# Altium schematic symbol library Brian_.SchLib: 123 symbols (part 1 of 4)
Pins are listed as number, name and electrical type; pins without a type are passive.

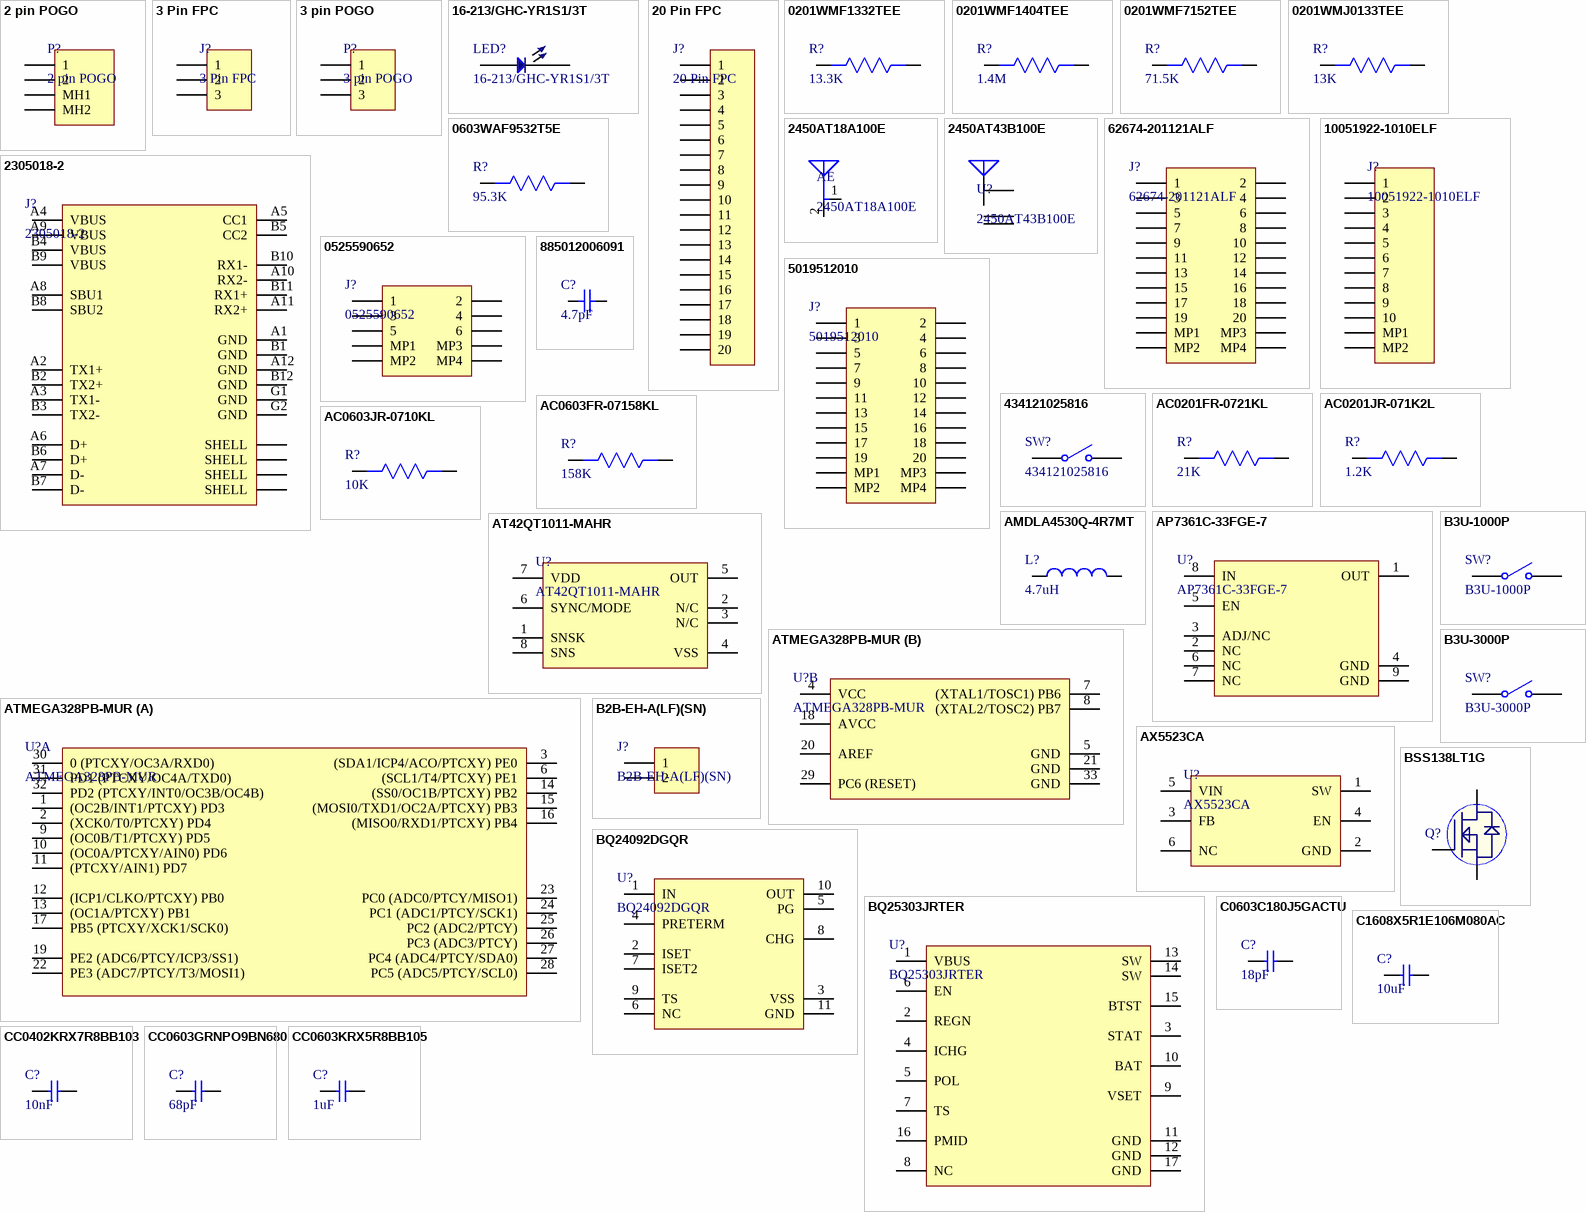
[diagram p0: symbols 2 pin POGO to CC0603KRX5R8BB105]

## 2 pin POGO
designator P?
2 Positions Pitch Magnets 2.3MM; Manufacturer: Hongkong RTL Industrial Ltd Store; Manufacturer Part No: *; Package: Custom; Link: https://pl.aliexpress.com/item/1005001616656419.html?spm=a2g0o.detail.1000023.11.291b5aa1UC9QtG
footprint 2 pin POGO
pins: 1, 2, MH1, MH2

## 3 Pin FPC
designator J?
CONN FPC 3POS 0.5MM SMD R/A; ComponentLink1URL: https://www.molex.com/pdm_docs/pk/5051479200-200.pdf?src-supplier=Digi-Key; ComponentLink1Description: https://www.molex.com/pdm_docs/pk/5051479200-200.pdf?src-supplier=Digi-Key; ComponentLink2URL: http://www.molex.com/pdm_docs/sd/5051470390_sd.pdf?src-supplier=Digi-Key; ComponentLink2Description: http://www.molex.com/pdm_docs/sd/5051470390_sd.pdf?src-supplier=Digi-Key; ComponentLink3URL: https://www.molex.com/pdm_docs/sd/5051470390_sd.pdf?src-supplier=Digi-Key; ComponentLink3Description: https://www.molex.com/pdm_docs/sd/5051470390_sd.pdf?src-supplier=Digi-Key
footprint 3 Pin FPC
pins: 1, 2, 3

## 3 pin POGO
designator P?
3 Positions Pitch Magnets 2.3MM; Manufacturer: Hongkong RTL Industrial Ltd Store; Manufacturer Part No: *; Package: Custom; Link: https://pl.aliexpress.com/item/33012000850.html
pins: 1, 2, 3

## 16-213/GHC-YR1S1/3T
designator LED?
Green 520~535nm 0402 Light Emitting Diodes (LED) RoHS; Manufacturer: Everlight Elec; Luminous Intensity (IF=20mA): 112~285mcd; Package: 0402; Illumination Color: Green; Dominant Wavelength / Coordinate rank: 520~535nm; Mounting Type: Surface Mount
footprint LED 0402 (Green 520~535nm 0402 Light Emitting Diodes (LED) RoHS)
pins: 1, 2

## 20 Pin FPC
designator J?
CONN FPC 20POS 0.5MM SMD R/A
footprint 20 Pin FPC
pins: 1, 2, 3, 4, 5, 6, 7, 8, 9, 10, 11, 12, 13, 14, 15, 16, 17, 18, 19, 20

## 0201WMF1332TEE
designator R?, comment 13.3K
RES SMD 13.3K  1/20W 0201; Manufacturer: UNI-ROYAL(Uniroyal Elec); Manufacturer Part No: 0201WMF1332TEE; Temperature Coefficient: ±200ppm/℃; Package: 0201; Power: 1/20W
footprint Res-0201
pins: 1, 2

## 0201WMF1404TEE
designator R?, comment 1.4M
1.4MΩ ±1% 1/20W ±200ppm/℃ 0201 Chip Resistor - Surface Mount RoHS; Manufacturer: UNI-ROYAL(Uniroyal Elec); Manufacturer Part No: 0201WMF1404TEE; Package: 0201; Resistance: 1.4MΩ; Tolerance: ±1%; Power(Watts): 1/20W; Temperature Coefficient: ±200ppm/℃
footprint Res-0201
pins: 1, 2

## 0201WMF7152TEE
designator R?, comment 71.5K
71.5kΩ ±1% 0.05W ±200ppm/℃ 0201 Chip Resistor - Surface Mount RoHS; Manufacturer: UNI-ROYAL(Uniroyal Elec); Package: 0201; Resistance: 71.5kΩ; Tolerance: ±1%; Power(Watts): Power(Watts); Temperature Coefficient1: ±200ppm/℃
footprint Res-0201
pins: 1, 2

## 0201WMJ0133TEE
designator R?, comment 13K
13kΩ ±5% 1/20W ±200ppm/℃ 0201 Chip Resistor - Surface Mount RoHS; Manufacturer: UNI-ROYAL(Uniroyal Elec); Package: 0201; Resistance: 13kΩ; Tolerance: ±5%; Power(Watts): 1/20W; Temperature Coefficient: ±200ppm/℃; Operating Temperature Range: -
footprint Res-0201
pins: 1, 2

## 0603WAF9532T5E
designator R?, comment 95.3K
95.3kΩ ±1% 0.1W ±100ppm/℃ 0603 Chip Resistor - Surface Mount RoHS; Manufacturer: UNI-ROYAL(Uniroyal Elec); Manufacturer Part No: 0603WAF9532T5E; Package: 0603; Value: 95.3K
footprint Res0603
pins: 1, 2

## 2450AT18A100E
designator AE
2.4GHz Chip RF Antenna 2.4GHz ~ 2.5GHz 0.5dBi Solder Surface Mount; MF: Johanson Technology; Price: None; SnapEDA_Link: https://www.snapeda.com/parts/2450AT18A100E/Johanson%20Technology%20Inc./view-part/267154/?ref=snap; Package: FBGA-780 Johanson; Availability: Unavailable; Value: *; MP: 2450AT18A100E
footprint 2450AT18A100E (RF ANT 2.4GHZ CHIP SOLDER SMD)
pins: 1 FEED, 2 NC

## 2450AT43B100E
designator U?
RF ANT 2.4GHZ CHIP SOLDER SMD; Manufacturer: Johanson; Impedance: 50R; Power Rating: 2W; Number of Bands: 1; Return Loss: -9.5dB; Max Frequency: 2.5GHz; Gain: -0.5dB; ComponentLink1URL: https://media.digikey.com/pdf/Data%20Sheets/Proant%20PDF's/PRO-OB-440_Dwg.PDF?src-supplier=Digi-Key; ComponentLink1Description: https://media.digikey.com/pdf/Data%20Sheets/Proant%20PDF's/PRO-OB-440_Dwg.PDF?src-supplier=Digi-Key; ComponentLink2URL: http://www.proant.se/files/user/Application%20note%20-%20OnBoard%20SMD%20GNSS%20rev%202.0.pdf?src-supplier=Digi-Key; ComponentLink2Description: http://www.proant.se/files/user/Application%20note%20-%20OnBoard%20SMD%20GNSS%20rev%202.0.pdf?src-supplier=Digi-Key; ComponentLink3URL: http://www.proant.se/files/user/Documents/Datasheet%20-%20OnBoard%20SMD%202400%20MHz%20rev%203.pdf?src-supplier=Digi-Key; ComponentLink3Description: http://www.proant.se/files/user/Documents/Datasheet%20-%20OnBoard%20SMD%202400%20MHz%20rev%203.pdf?src-supplier=Digi-Key; Supplier 1: Digi-Key; Manufacturer Part Number: 2450AT43B100E; Stock 1: 0; Pricing 1: 1=0.71, 10=0.624, 25=0.586, 100=0.4782, 250=0.4442, 500=0.378 (USD); Mount: Surface Mount; Case/Package: SMD/SMT; Number of Pins: 4; Contact Plating: Tin; Package Quantity: 1; Packaging: Tape and Reel; Max Power Dissipation: 2W; Termination: Solder; Frequency: 2.4GHz; Series: -; Min Frequency: 2.4GHz; Input Impedance: 50R; Input Power: 2W; Length: 7mm; Width: 2mm; Height: 0.079inch; Radiation Hardening: No; REACH SVHC: Unknown; ComponentLink4URL: http://www.farnell.com/datasheets/1860765.pdf?src-supplier=Element14; ComponentLink4Description: http://www.farnell.com/datasheets/1860765.pdf?src-supplier=Element14; ComponentLink5URL: http://www.mouser.com/ds/2/611/2450AT43B100-242468.pdf?src-supplier=Mouser; ComponentLink5Description: http://www.mouser.com/ds/2/611/2450AT43B100-242468.pdf?src-supplier=Mouser; ComponentLink6URL: https://www.johansontechnology.com/datasheets/2450AT43B100/2450AT43B100.pdf?src-supplier=Digi-Key; ComponentLink6Description: https://www.johansontechnology.com/datasheets/2450AT43B100/2450AT43B100.pdf?src-supplier=Digi-Key; Supplier Part Number 1: 712-1010-1-ND
footprint 2450AT43B100E (RF ANT 2.4GHZ CHIP SOLDER SMD)
pins: 1 A, 2 A, 3 A hidden, 4 A hidden

## 62674-201121ALF
designator J?
CONN FFC VERT 20POS 0.50MM SMD; Manufacturer: AMPHENOL ICC (FCI); Supplier 1: Digi-Key; Manufacturer Part Number: 62674-201121ALF; RoHS: No; Stock 1: 6990; Pricing 1: 1=0.77000, 10=0.67800, 25=0.63840, 50=0.61160, 100=0.58510, 250=0.53188, 500=0.47868 (USD); ComponentLink1URL: http://www.farnell.com/datasheets/2357988.pdf?src-supplier=Farnell; ComponentLink1Description: http://www.farnell.com/datasheets/2357988.pdf?src-supplier=Farnell; ComponentLink2URL: http://www.farnell.com/datasheets/2357988.pdf?src-supplier=Newark; ComponentLink2Description: http://www.farnell.com/datasheets/2357988.pdf?src-supplier=Newark; Supplier Part Number 1: 609-1207-1-ND
footprint 62674-201121ALF
pins: 1, 2, 3, 4, 5, 6, 7, 8, 9, 10, 11, 12, 13, 14, 15, 16, 17, 18, 19, 20, MP1, MP2, MP3, MP4

## 2305018-2
designator J?
CONN RCP USB3.1 TYPEC 24P SMD RA; Manufacturer: TE Connectivity AMP; Connector Type: USB; Number of Contacts: 24; Gender: Receptacle; Number of Ports: 1; Current Rating: 1.25A; Voltage Rating: 30V; Shielding: Shielded; Ratings: Waterproof; Supplier 1: Digi-Key; Manufacturer Part Number: 2305018-2; RoHS: Yes; Category: USB Connectors; Stock 1: 4590; Pricing 1: 1=3.00000, 10=2.87800, 25=2.63840, 50=2.51840, 100=2.39840, 250=2.09864 (USD); Mount: Surface Mount,Through Hole; Contact Plating: Gold; Insulation Color: Black; Min Operating Temperature: -40°C; Max Operating Temperature: 85°C; Packaging: Tape and Reel; Termination: Solder; Flammability Rating: UL94 V-0; RoHS Compliant: Yes; ComponentLink1URL: http://www.farnell.com/datasheets/2611889.pdf?src-supplier=Farnell; ComponentLink1Description: http://www.farnell.com/datasheets/2611889.pdf?src-supplier=Farnell; ComponentLink2URL: https://www.te.com/commerce/DocumentDelivery/DDEController?Action=srchrtrv&DocNm=2305018&DocType=Customer+Drawing&DocLang=English&src-supplier=Digi-Key; ComponentLink2Description: https://www.te.com/commerce/DocumentDelivery/DDEController?Action=srchrtrv&DocNm=2305018&DocType=Customer+Drawing&DocLang=English&src-supplier=Digi-Key; ComponentLink3URL: http://www.farnell.com/datasheets/2611889.pdf?src-supplier=Newark; ComponentLink3Description: http://www.farnell.com/datasheets/2611889.pdf?src-supplier=Newark; Supplier Part Number 1: A132569CT-ND
footprint 2305018-2
pins: A1 GND (power), A2 TX1+, A3 TX1-, A4 VBUS (power), A5 CC1, A6 D+, A7 D-, A8 SBU1, A9 VBUS (power), A10 RX2-, A11 RX2+, A12 GND (power), B1 GND (power), B2 TX2+, B3 TX2-, B4 VBUS (power), B5 CC2, B6 D+, B7 D-, B8 SBU2, B9 VBUS (power), B10 RX1-, B11 RX1+, B12 GND (power), G1 GND (power), G2 GND (power), S1 SHELL, S2 SHELL, S3 SHELL, S4 SHELL

## 10051922-1010ELF
designator J?
CONN FPC BOTTOM 10POS 0.50MM R/A; Manufacturer: Amphenol ICC / FCI; Actuator Material: Nylon,Glass,Polyamide; Number of Contacts: 10; Contact Resistance: 30mR; Current Rating: 500mA; Voltage Rating: 50V; Insulation Resistance: 100MR; Gender: Female; Pitch: 0.5mm; Supplier 1: Digi-Key; Manufacturer Part Number: 10051922-1010ELF; RoHS: Yes; Category: FFC / FPC; Stock 1: 3582; Pricing 1: 1=0.88000, 10=0.77600, 25=0.73040, 50=0.70000, 100=0.66950, 250=0.60864, 500=0.54776, 1000=0.48690 (USD); Mount: Surface Mount; Contact Material: Copper Alloy,Bronze; Contact Plating: Gold; Housing Color: Natural; Housing Material: Polymer; Min Operating Temperature: -55°C; Max Operating Temperature: 85°C; Number of Rows: 1; Termination: Solder; Orientation: Right Angle; Packaging: Tape and Reel; Package Quantity: 4500; Number of Positions: 10; Contact Location: Bottom; Max Voltage Rating (AC): 50V; Max Voltage Rating (DC): 50V; Series: VLL; Length: 7.5mm; Width: 3.4mm; Depth: 3.4mm; Radiation Hardening: No; REACH SVHC: No SVHC; Lead Free: Lead Free; Flammability Rating: UL94 V-0; ComponentLink1URL: https://datasheet.ciiva.com/10367/10051922-10367679.pdf?src-supplier=Avnet; ComponentLink1Description: https://datasheet.ciiva.com/10367/10051922-10367679.pdf?src-supplier=Avnet; ComponentLink2URL: https://datasheet.ciiva.com/15176/getdatasheetpartid-131484-15176375.pdf?src-supplier=Verical; ComponentLink2Description: https://datasheet.ciiva.com/15176/getdatasheetpartid-131484-15176375.pdf?src-supplier=Verical; ComponentLink3URL: https://datasheet.ciiva.com/1437/10051922-1437495.pdf?src-supplier=Element14; ComponentLink3Description: https://datasheet.ciiva.com/1437/10051922-1437495.pdf?src-supplier=Element14; ComponentLink4URL: https://datasheet.ciiva.com/670/10051922-670058.pdf?src-supplier=Digi-Key; ComponentLink4Description: https://datasheet.ciiva.com/670/10051922-670058.pdf?src-supplier=Digi-Key; ComponentLink5URL: https://datasheet.ciiva.com/670/10051922-670057.pdf?src-supplier=Digi-Key; ComponentLink5Description: https://datasheet.ciiva.com/670/10051922-670057.pdf?src-supplier=Digi-Key; ComponentLink6URL: https://datasheet.ciiva.com/670/10051922-670059.pdf?src-supplier=Digi-Key; ComponentLink6Description: https://datasheet.ciiva.com/670/10051922-670059.pdf?src-supplier=Digi-Key; ComponentLink7URL: https://datasheet.ciiva.com/5136/fcicmd-catcustomerdrawingproductname-10051922-1010elf-5136554.pdf?src-supplier=Mouser; ComponentLink7Description: https://datasheet.ciiva.com/5136/fcicmd-catcustomerdrawingproductname-10051922-1010elf-5136554.pdf?src-supplier=Mouser; Supplier Part Number 1: 609-1234-1-ND
footprint 10051922-1010ELF
pins: 1, 2, 3, 4, 5, 6, 7, 8, 9, 10, MP1, MP2

## 0525590652
designator J?
CONN FFC VERT 6POS 0.50MM SMD; Manufacturer: Molex; Manufacturer Part Number: 52559-0652; Current Rating: 500mA; Voltage Rating: 50V; Contact Resistance: 20mR; Max Voltage Rating (DC): 5.05kV; Number of Positions: 6; Gender: Receptacle; Stackable: No; Pitch: 1mm; Supplier 1: Avnet; RoHS: Yes; Category: FFC / FPC; Pricing 1: 1=1.20000, 25=0.98300, 100=0.83000, 250=0.81700, 500=0.80300 (USD); Contact Material: Bronze; Contact Plating: Gold,Tin; Housing Color: Natural; Housing Material: Nylon; Material: Bronze; Min Operating Temperature: -20°C; Max Operating Temperature: 85°C; Number of Rows: 1; Package Quantity: 1000; Packaging: Tape and Reel; Termination: Solder; Number of Contacts: 6; Max Voltage Rating (AC): 50V; Orientation: Vertical; Number of Circuits: 6; Length: 8.7mm; Depth: 3.5mm; Radiation Hardening: No; Flammability Rating: UL94 V-0; REACH SVHC: Unknown; Lead Free: Lead Free; ELV: Compliant; ComponentLink1URL: https://datasheet.ciiva.com/11745/0900766b80f757b2-11745249.pdf?src-supplier=RSComponents; ComponentLink1Description: https://datasheet.ciiva.com/11745/0900766b80f757b2-11745249.pdf?src-supplier=RSComponents; ComponentLink2URL: https://datasheet.ciiva.com/16660/0525590652-ffc-fpc-connectors-16660258.pdf?src-supplier=Avnet+Europe; ComponentLink2Description: https://datasheet.ciiva.com/16660/0525590652-ffc-fpc-connectors-16660258.pdf?src-supplier=Avnet+Europe; ComponentLink3URL: https://datasheet.ciiva.com/26929/getdatasheetpartid-766345-26929890.pdf?src-supplier=Verical; ComponentLink3Description: https://datasheet.ciiva.com/26929/getdatasheetpartid-766345-26929890.pdf?src-supplier=Verical; ComponentLink4URL: https://datasheet.ciiva.com/16120/350040525590652-ffc-fpc-nectors-16120310.pdf?src-supplier=Onlinecomponents.com; ComponentLink4Description: https://datasheet.ciiva.com/16120/350040525590652-ffc-fpc-nectors-16120310.pdf?src-supplier=Onlinecomponents.com; ComponentLink5URL: https://datasheet.ciiva.com/23909/1717446-23909238.pdf?src-supplier=Newark; ComponentLink5Description: https://datasheet.ciiva.com/23909/1717446-23909238.pdf?src-supplier=Newark; ComponentLink6URL: https://datasheet.ciiva.com/30083/0525590652-ffc-fpc-connectors-30083929.pdf?src-supplier=Onlinecomponents.com; ComponentLink6Description: https://datasheet.ciiva.com/30083/0525590652-ffc-fpc-connectors-30083929.pdf?src-supplier=Onlinecomponents.com; ComponentLink7URL: https://datasheet.ciiva.com/5137/0525590652-ffc-fpc-connectors-170521-5137210.pdf?src-supplier=Mouser; ComponentLink7Description: https://datasheet.ciiva.com/5137/0525590652-ffc-fpc-connectors-170521-5137210.pdf?src-supplier=Mouser; ComponentLink8URL: https://datasheet.ciiva.com/10034/0525590652-ffc-fpc-connectors-10034906.pdf?src-supplier=Avnet; ComponentLink8Description: https://datasheet.ciiva.com/10034/0525590652-ffc-fpc-connectors-10034906.pdf?src-supplier=Avnet; Supplier Part Number 1: 41Y0644
footprint 0525590652
pins: 1, 2, 3, 4, 5, 6, MP1, MP2, MP3, MP4

## 5019512010
designator J?
CONN FFC VERT 20POS 0.50MM SMD; Manufacturer: Molex; Manufacturer Part Number: 501951-2010; Actuator Material: Nylon,Glass,Polyamide; Actuator Color: Brown; Number of Contacts: 20; Voltage Rating: 50V; Current Rating: 400mA; Contact Resistance: 40mR; Gender: Receptacle; Wire/Cable Type: Straight; Stackable: No; Pitch: 1mm; Glow Wire Compliant: Non-compliant; Supplier 1: Digi-Key; RoHS: Yes; Category: Headers and Wire Housings; Stock 1: 15414; Pricing 1: 1=1.31000, 10=1.08500, 100=0.90400, 1000=0.72320 (USD); Contact Material: Copper Alloy,Bronze; Contact Plating: Gold; Housing Color: White; Material: Bronze; Housing Material: Polymer; Min Operating Temperature: -25°C; Max Operating Temperature: 85°C; Number of Rows: 1; Termination: Solder; Orientation: Vertical; Package Quantity: 2000; Voltage Rating (AC): 50V; Packaging: Tape and Reel; Number of Positions: 20; Max Voltage Rating (AC): 50V; Number of Circuits: 20; Mating Cycles: 20; Series: Easy-On 501951; Length: 12.8mm; Depth: 4.5mm; Radiation Hardening: No; REACH SVHC: Unknown; ELV: Compliant; Lead Free: Lead Free; Flammability Rating: UL94 V-0; RoHS Compliant: Yes; ComponentLink1URL: https://datasheet.ciiva.com/6960/5019512010-sd-6960209.pdf?src-supplier=Digi-Key; ComponentLink1Description: https://datasheet.ciiva.com/6960/5019512010-sd-6960209.pdf?src-supplier=Digi-Key; ComponentLink2URL: https://datasheet.ciiva.com/10034/5019512010-ffc-fpc-connectors-10034379.pdf?src-supplier=Avnet; ComponentLink2Description: https://datasheet.ciiva.com/10034/5019512010-ffc-fpc-connectors-10034379.pdf?src-supplier=Avnet; ComponentLink3URL: https://datasheet.ciiva.com/6960/5019512010-sd-6960213.pdf?src-supplier=Digi-Key; ComponentLink3Description: https://datasheet.ciiva.com/6960/5019512010-sd-6960213.pdf?src-supplier=Digi-Key; Supplier Part Number 1: WM9061CT-ND
footprint 5019512010
pins: 1, 2, 3, 4, 5, 6, 7, 8, 9, 10, 11, 12, 13, 14, 15, 16, 17, 18, 19, 20, MP1, MP2, MP3, MP4

## 434121025816
designator SW?
SWITCH TACTILE SPST-NO 0.05A 12V; Manufacturer: Wurth Electronics; Mechanical Life: 50000Cycles; Actuator Material: Polymer,Liquid Crystal Polymer; Contact Current Rating: 50mA; Operating Force: 160gf; Illumination Type: Non-Illuminated,Illuminated; Throw Configuration: SPST; Insulation Resistance: 100MR; Switch Travel: 0.25mm; Switch Function: Off-Mom; Actuator Type: Standard; Actuator Length: 0.8mm; Supplier 1: Digi-Key; Manufacturer Part Number: 434121025816; RoHS: Yes; Category: Tactile Switches; Stock 1: 2355; Pricing 1: 1=0.55000, 50=0.50700, 100=0.46100, 500=0.41900, 1000=0.36400 (USD); Mount: Surface Mount; Contact Material: Stainless Steel,Steel; Min Operating Temperature: -40°C; Max Operating Temperature: 85°C; Current Rating: 50mA; Packaging: Tape and Reel; Termination: SMD/SMT; Length: 7.3mm; Width: 3.9mm; Height: 2.5mm; REACH SVHC: No SVHC; Lead Free: Lead Free; ComponentLink1URL: https://datasheet.ciiva.com/30466/0900766b8126b630-30466740.pdf?src-supplier=RSComponents; ComponentLink1Description: https://datasheet.ciiva.com/30466/0900766b8126b630-30466740.pdf?src-supplier=RSComponents; ComponentLink2URL: https://datasheet.ciiva.com/29123/711753-da-01-en-taster-434121025816-29123820.pdf?src-supplier=Conrad; ComponentLink2Description: https://datasheet.ciiva.com/29123/711753-da-01-en-taster-434121025816-29123820.pdf?src-supplier=Conrad; ComponentLink3URL: https://datasheet.ciiva.com/1532/434121025816-1532523.pdf?src-supplier=Element14; ComponentLink3Description: https://datasheet.ciiva.com/1532/434121025816-1532523.pdf?src-supplier=Element14; ComponentLink4URL: https://datasheet.ciiva.com/1633/434121025816-1633932.pdf?src-supplier=Farnell; ComponentLink4Description: https://datasheet.ciiva.com/1633/434121025816-1633932.pdf?src-supplier=Farnell; Supplier Part Number 1: 732-7045-1-ND
footprint 434121025816 (SWITCH TACTILE SPST-NO 0.05A 12V)
pins: 1, 2

## 885012006091
designator C?, comment 4.7pF
CAP CER 4.7PF 100V C0G/NP0 0603; Manufacturer: Wurth Electronics; Manufacturer Part Number: 885012006091; Supplier 1: Digi-Key; RoHS: No; Category: Ceramic Capacitors; Stock 1: 525; Pricing 1: 1=0.10000, 10=0.04600, 100=0.04100, 500=0.03624 (USD); Mount: Surface Mount; Case/Package: 0603; Case Code (Imperial): 0603; Case Code (Metric): 1608; Min Operating Temperature: -55°C; Max Operating Temperature: 125°C; Packaging: Cut Tape; Capacitance: 4.7pF; Voltage Rating: 100V; ComponentLink1URL: http://www.farnell.com/datasheets/2546610.pdf?src-supplier=Farnell; ComponentLink1Description: http://www.farnell.com/datasheets/2546610.pdf?src-supplier=Farnell; ComponentLink2URL: https://katalog.we-online.de/pbs/datasheet/885012006091.pdf?src-supplier=Digi-Key; ComponentLink2Description: https://katalog.we-online.de/pbs/datasheet/885012006091.pdf?src-supplier=Digi-Key; ComponentLink3URL: http://www.farnell.com/datasheets/2546610.pdf?src-supplier=Newark; ComponentLink3Description: http://www.farnell.com/datasheets/2546610.pdf?src-supplier=Newark; Supplier Part Number 1: 732-12048-1-ND
footprint Cap0603
pins: 1, 2

## AC0201FR-0721KL
designator R?, comment 21K
Res SMD 21K Ohm 1% 1/20W 0201; Manufacturer: Yageo; Manufacturer Part Number: AC0201FR-0721KL; Resistance: 21kR; Max Power Dissipation: 50mW; Temperature Coefficient: 200ppm/°C; Supplier 1: Avnet; RoHS: Yes; Category: Chip SMD Resistors; Pricing 1: 10000=0.00168, 20000=0.00165, 40000=0.00161, 60000=0.00157, 80000=0.00151, 100000=0.00148, 1000000=0.00144 (USD); Case/Package: 0201; Min Operating Temperature: -55°C; Max Operating Temperature: 155°C; Packaging: Tape and Reel; Resistor Type: Thick Film; Number of Terminations: 2; Tolerance: 1%; Features: Moisture Resistant,Automotive AEC-Q200; Length: 0.024inch; Width: 0.012inch; Height: 0.01inch; RoHS Compliant: Yes; ComponentLink1URL: http://www.yageo.com/NewPortal/yageodocoutput?fileName=/pdf/R-Chip/PYu-AC_51_RoHS_L_6.pdf&src-supplier=Digi-Key; ComponentLink1Description: http://www.yageo.com/NewPortal/yageodocoutput?fileName=/pdf/R-Chip/PYu-AC_51_RoHS_L_6.pdf&src-supplier=Digi-Key; Supplier Part Number 1: AC0201FR-0721KL
footprint Res-0201
pins: 1, 2

## AC0201JR-071K2L
designator R?, comment 1.2K
Chip Resistor Automotive Grade Thick Film 0201 1.2kOhm 5% Paper T/R; Manufacturer: Yageo; Manufacturer Part Number: AC0201JR-071K2L; Resistance: 1.2kR; Max Power Dissipation: 50mW; Temperature Coefficient: 200ppm/°C; Supplier 1: Avnet; RoHS: Yes; Category: Chip SMD Resistors; Pricing 1: 10000=0.00143, 20000=0.00141, 40000=0.00137, 60000=0.00134, 80000=0.00129, 100000=0.00126, 1000000=0.00123 (USD); Case/Package: 0201; Min Operating Temperature: -55°C; Max Operating Temperature: 155°C; Packaging: Tape and Reel; Resistor Type: Thick Film; Number of Terminations: 2; Tolerance: 5%; Features: Moisture Resistant,Automotive AEC-Q200; Length: 0.024inch; Width: 0.012inch; Height: 0.01inch; RoHS Compliant: Yes; ComponentLink1URL: http://www.yageo.com/NewPortal/yageodocoutput?fileName=/pdf/R-Chip/PYu-AC_51_RoHS_L_6.pdf&src-supplier=Digi-Key; ComponentLink1Description: http://www.yageo.com/NewPortal/yageodocoutput?fileName=/pdf/R-Chip/PYu-AC_51_RoHS_L_6.pdf&src-supplier=Digi-Key; Supplier Part Number 1: AC0201JR-071K2L
footprint Res-0201
pins: 1, 2

## AC0603FR-07158KL
designator R?, comment 158K
RES SMD 158K OHM 1% 1/10W 0603; Manufacturer: Yageo; Manufacturer Part Number: AC0603FR-07158KL; Resistance: 158kR; Max Power Dissipation: 100mW; Temperature Coefficient: 100ppm/°C; Supplier 1: Digi-Key; RoHS: Yes; Category: Chip SMD Resistors; Stock 1: 2375; Pricing 1: 1=0.10000, 10=0.02900, 100=0.01170, 1000=0.00527, 2500=0.00458 (USD); Case/Package: 0603; Min Operating Temperature: -55°C; Max Operating Temperature: 155°C; Packaging: Tape and Reel; Resistor Type: Thick Film; Number of Terminations: 2; Tolerance: 1%; Features: Moisture Resistant,Automotive AEC-Q200; Length: 0.063inch; Width: 0.031inch; Height: 0.022inch; RoHS Compliant: Yes; ComponentLink1URL: http://www.yageo.com/NewPortal/yageodocoutput?fileName=/pdf/R-Chip/PYu-AC_51_RoHS_L_6.pdf&src-supplier=Digi-Key; ComponentLink1Description: http://www.yageo.com/NewPortal/yageodocoutput?fileName=/pdf/R-Chip/PYu-AC_51_RoHS_L_6.pdf&src-supplier=Digi-Key; Supplier Part Number 1: 13-AC0603FR-07158KLCT-ND
footprint Res0603
pins: 1, 2

## AC0603JR-0710KL
designator R?, comment 10K
RES SMD 10K OHM 5% 1/10W 0603; Manufacturer: Yageo; Manufacturer Part Number: AC0603JR-0710KL; Voltage Rating: 50V; Resistance: 10kR; Power Rating: 100mW; Temperature Coefficient: 100ppm/°C; Supplier 1: Future Electronics; RoHS: Yes; Category: Chip SMD Resistors; Stock 1: 1533000; Pricing 1: 5000=0.00540 (USD); Case/Package: 0603; Case Code (Imperial): 0603; Case Code (Metric): 1608; Size Code: 0603; Min Operating Temperature: -55°C; Max Operating Temperature: 155°C; Packaging: Tape and Reel; Tolerance: 5%; Package Quantity: 1; Resistor Type: Thick Film; Termination: SMD/SMT; Number of Terminations: 2; Max Power Dissipation: 100mW; Features: Moisture Resistant,Automotive AEC-Q200,Anti-Sulfur; Series: AC; Construction: Rectangular; Length: 0.063inch; Width: 0.031inch; Height: 0.022inch; Depth: 0.8mm; Military Standard: Not; Lead Free: Lead Free; RoHS Compliant: Yes; ComponentLink1URL: https://datasheet.ciiva.com/5562/pyu-ac-51-rohs-l-2-5562553.pdf?src-supplier=Mouser; ComponentLink1Description: https://datasheet.ciiva.com/5562/pyu-ac-51-rohs-l-2-5562553.pdf?src-supplier=Mouser; Supplier Part Number 1: 1029044
footprint Res0603
pins: 1, 2

## AMDLA4530Q-4R7MT
designator L?, comment 4.7uH
FIXED IND 4.7UH 5A 52 MOHM SMD; Manufacturer: Abracon; Manufacturer Part Number: AMDLA4530Q-4R7MT; Supplier 1: Digi-Key; Stock 1: 963; Pricing 1: 1=1.08000, 10=1.00500, 25=0.92720, 50=0.77280, 100=0.72640, 250=0.64916, 500=0.55642 (USD); Supplier Part Number 1: 535-AMDLA4530Q-4R7MTCT-ND
footprint AMDLA4530Q-4R7MT
pins: 1, 2

## AP7361C-33FGE-7
designator U?
IC REG LINEAR 3.3V 1A UDFN3030-8; Manufacturer: Diodes; Dropout Voltage: 360mV; Number of Regulators: 1; Min Current Limit: 1.1A; Supplier 1: Digi-Key; Manufacturer Part Number: AP7361C-33FGE-7; RoHS: Yes; Category: Voltage Regulators - Linear; Stock 1: 84; Pricing 1: 1=0.56000, 10=0.48100, 25=0.44880, 100=0.35910, 250=0.33348, 500=0.28218, 1000=0.21804 (USD); Mount: Surface Mount; Min Operating Temperature: -40°C; Max Operating Temperature: 85°C; Packaging: Tape and Reel; Output Voltage: 3.3V; Output Current: 1A; RoHS Compliant: Yes; ComponentLink1URL: http://www.mouser.com/ds/2/115/AP7361C-775034.pdf?src-supplier=Mouser; ComponentLink1Description: http://www.mouser.com/ds/2/115/AP7361C-775034.pdf?src-supplier=Mouser; ComponentLink2URL: https://www.diodes.com/assets/Datasheets/AP7361C.pdf?src-supplier=Digi-Key; ComponentLink2Description: https://www.diodes.com/assets/Datasheets/AP7361C.pdf?src-supplier=Digi-Key; Supplier Part Number 1: AP7361C-33FGE-7DICT-ND
footprint U-DFN3030-8 (Fixed 6V 3.3V 360mV @ 1A UDFN-8 Dropout Regulators(LDO) RoHS)
pins: 1 OUT, 2 NC, 3 ADJ/NC, 4 GND, 5 EN, 6 NC, 7 NC, 8 IN, 9 GND

## AT42QT1011-MAHR
designator U?
IC SENSR TOUCH/PROX 1CH 8-UDFN; Manufacturer: Microchip; Supplier 1: Digi-Key; Manufacturer Part Number: AT42QT1011-MAHR; RoHS: No; Category: Integrated Circuits (ICs); Stock 1: 3160; Pricing 1: 1=0.61000, 25=0.56000, 100=0.50700 (USD); ComponentLink1URL: http://www.microchip.com/mymicrochip/filehandler.aspx?ddocname=en590560&src-supplier=Digi-Key; ComponentLink1Description: http://www.microchip.com/mymicrochip/filehandler.aspx?ddocname=en590560&src-supplier=Digi-Key; Supplier Part Number 1: AT42QT1011-MAHRCT-ND
footprint 8-UDFN
pins: 1 SNSK, 2 N/C, 3 N/C, 4 VSS, 5 OUT, 6 SYNC/MODE, 7 VDD, 8 SNS

## ATMEGA328PB-MUR
designator U?
IC MCU 8BIT 32KB FLASH 32VFQFN
footprint 32-VQFN (IC MCU 8BIT 32KB FLASH 32VFQFN)
part A pins: 1 (OC2B/INT1/PTCXY) PD3, 2 (XCK0/T0/PTCXY) PD4, 3 (SDA1/ICP4/ACO/PTCXY) PE0, 6 (SCL1/T4/PTCXY) PE1, 9 (OC0B/T1/PTCXY) PD5, 10 (OC0A/PTCXY/AIN0) PD6, 11 (PTCXY/AIN1) PD7, 12 (ICP1/CLKO/PTCXY) PB0, 13 (OC1A/PTCXY) PB1, 14 (SS0/OC1B/PTCXY) PB2, 15 (MOSI0/TXD1/OC2A/PTCXY) PB3, 16 (MISO0/RXD1/PTCXY) PB4, 17 PB5 (PTCXY/XCK1/SCK0), 19 PE2 (ADC6/PTCY/ICP3/SS1), 22 PE3 (ADC7/PTCY/T3/MOSI1), 23 PC0 (ADC0/PTCY/MISO1), 24 PC1 (ADC1/PTCY/SCK1), 25 PC2 (ADC2/PTCY), 26 PC3 (ADC3/PTCY), 27 PC4 (ADC4/PTCY/SDA0), 28 PC5 (ADC5/PTCY/SCL0), 30 0 (PTCXY/OC3A/RXD0), 31 PD1 (PTCXY/OC4A/TXD0), 32 PD2 (PTCXY/INT0/OC3B/OC4B)
part B pins: 4 VCC, 5 GND, 7 (XTAL1/TOSC1) PB6, 8 (XTAL2/TOSC2) PB7, 18 AVCC, 20 AREF, 21 GND, 29 PC6 (RESET), 33 GND

## AX5523CA
designator U?
Step-Up Positive Adjustable 1 2A 1.2MHz SOT-23-6 DC-DC Converters RoHS; Manufacturer: Axelite Tech; Manufacturer Part No: AX5523CA; Package: SOT-23-6; Value: *
footprint SOT-23-6 (IC BAT CHG LI-ION 1 CELL SOT23-6)
pins: 1 SW, 2 GND, 3 FB, 4 EN, 5 VIN, 6 NC

## B2B-EH-A(LF)(SN)
designator J?
CONN HEADER VERT 2POS 2.5MM; Manufacturer: JST; Current Rating: 3A; Voltage Rating: 250V; Contact Resistance: 20mR; Number of Positions: 2; Connector Type: Male Pin,Plug; Gender: Male; Supplier 1: Digi-Key; Manufacturer Part Number: B2B-EH-A(LF)(SN); Stock 1: 25023; Pricing 1: 1=0.14, 10=0.131, 100=0.0809, 500=0.06698, 1000=0.05861, 5000=0.05024, 10000=0.04884 (USD); Mount: Through Hole; Contact Material: Copper Alloy,Brass; Color: Natural; Contact Plating: Tin,Copper; Housing Color: White; Housing Material: Nylon; Min Operating Temperature: -25°C; Max Operating Temperature: 85°C; Number of Rows: 1; Fastening Type: Detent; Packaging: Bulk; Max Current Rating: 3A; Termination: Press-Fit; Number of Contacts: 2; Max Voltage Rating (AC): 250V; Orientation: Straight; Length: 7.5mm; Pitch: 2.5mm; Contact Mating Length: 0.13inch; Depth: 3.8mm; Lead Free: Lead Free; ComponentLink1URL: http://uk.rs-online.com/webdocs/05aa/0900766b805aab1f.pdf?src-supplier=RSComponents; ComponentLink1Description: http://uk.rs-online.com/webdocs/05aa/0900766b805aab1f.pdf?src-supplier=RSComponents; ComponentLink2URL: http://www.jst-mfg.com/product/pdf/eng/eEH.pdf?src-supplier=Digi-Key; ComponentLink2Description: http://www.jst-mfg.com/product/pdf/eng/eEH.pdf?src-supplier=Digi-Key; ComponentLink3URL: https://www.verical.com/server-webapp/html/getDatasheet?partID=639961&src-supplier=Verical; ComponentLink3Description: https://www.verical.com/server-webapp/html/getDatasheet?partID=639961&src-supplier=Verical; ComponentLink4URL: http://www1.futureelectronics.com/doc/JST/B2B-EH-A(LF)(SN).pdf?src-supplier=Future+Electronics; ComponentLink4Description: http://www1.futureelectronics.com/doc/JST/B2B-EH-A(LF)(SN).pdf?src-supplier=Future+Electronics; ComponentLink5URL: http://www.produktinfo.conrad.com/datenblaetter/1200000-1299999/001217319-da-01-en-STIFTLEISTE_GERADE_2_POL__RM_25MM.pdf?src-supplier=Conrad; ComponentLink5Description: http://www.produktinfo.conrad.com/datenblaetter/1200000-1299999/001217319-da-01-en-STIFTLEISTE_GERADE_2_POL__RM_25MM.pdf?src-supplier=Conrad; Supplier Part Number 1: 455-1611-ND
footprint B2B-EH-A(LF)(SN)
pins: 1, 2

## B3U-1000P
designator SW?
SWITCH TACTILE SPST-NO 0.05A 12V; Manufacturer: Omron; Mechanical Life: 200000Cycles; Operating Force: 1.5N; Throw Configuration: SPST; Current Rating: 50mA; Contact Resistance: 100mR; Illumination Type: Non-Illuminated,Illuminated; Switch Travel: 0.15mm; Switch Function: Off-Mom; Actuator Type: Standard; Actuator Length: 0.4mm; Ratings: Dust Proof,IP40; ComponentLink1URL: http://www.farnell.com/datasheets/60838.pdf?src-supplier=Farnell; ComponentLink1Description: http://www.farnell.com/datasheets/60838.pdf?src-supplier=Farnell; ComponentLink2URL: http://www.farnell.com/datasheets/60838.pdf?src-supplier=Element14; ComponentLink2Description: http://www.farnell.com/datasheets/60838.pdf?src-supplier=Element14; ComponentLink3URL: https://omronfs.omron.com/en_US/ecb/products/pdf/en-b3u.pdf?src-supplier=Digi-Key; ComponentLink3Description: https://omronfs.omron.com/en_US/ecb/products/pdf/en-b3u.pdf?src-supplier=Digi-Key; ComponentLink4URL: http://www.omron.com/ecb/products/pdf/en-b3u.pdf?src-supplier=Digi-Key; ComponentLink4Description: http://www.omron.com/ecb/products/pdf/en-b3u.pdf?src-supplier=Digi-Key; ComponentLink5URL: https://www.distrelec.biz/Web/Downloads/he/et/B3U_eng_datasheet.pdf?mime=application%2Fpdf&src-supplier=Distrelec; ComponentLink5Description: https://www.distrelec.biz/Web/Downloads/he/et/B3U_eng_datasheet.pdf?mime=application%2Fpdf&src-supplier=Distrelec; ComponentLink6URL: http://www.onlinecomponents.com/productFiles/mf-OM/en-b3u.pdf?src-supplier=Onlinecomponents.com; ComponentLink6Description: http://www.onlinecomponents.com/productFiles/mf-OM/en-b3u.pdf?src-supplier=Onlinecomponents.com; Supplier 1: Digi-Key; Manufacturer Part Number: B3U-1000P; Stock 1: 116454; Pricing 1: 1=1, 10=0.961, 25=0.9064, 50=0.7976, 100=0.7251, 250=0.68888, 500=0.67074, 1000=0.52571 (USD); Mount: Surface Mount; Weight: 0.000776oz; Contact Material: Silver; Min Operating Temperature: -25°C; Max Operating Temperature: 70°C; Packaging: Tape and Reel; Voltage Rating (DC): 12V; Package Quantity: 1; Max Current Rating: 50mA; Termination: SMD/SMT; Orientation: Straight; Max Voltage Rating (DC): 12V; Electrical Life: 200000Cycles; Insulation Resistance: 100MR; Contact Current Rating: 50mA; Length: 4mm; Height: 1.2mm; Depth: 2.5mm; Width: 3mm; REACH SVHC: Unknown; Lead Free: Lead Free; ComponentLink7URL: https://www.verical.com/server-webapp/html/getDatasheet?partID=552554&src-supplier=Verical; ComponentLink7Description: https://www.verical.com/server-webapp/html/getDatasheet?partID=552554&src-supplier=Verical; ComponentLink8URL: http://www.farnell.com/datasheets/1685550.pdf?src-supplier=Element14; ComponentLink8Description: http://www.farnell.com/datasheets/1685550.pdf?src-supplier=Element14; ComponentLink9URL: http://www.farnell.com/datasheets/2610940.pdf?src-supplier=Farnell; ComponentLink9Description: http://www.farnell.com/datasheets/2610940.pdf?src-supplier=Farnell; ComponentLink10URL: https://www.alliedelec.com/m/d/4c8a9ef82804fc3c241a13c1e298fd73.pdf?src-supplier=Allied+Electronics; ComponentLink10Description: https://www.alliedelec.com/m/d/4c8a9ef82804fc3c241a13c1e298fd73.pdf?src-supplier=Allied+Electronics; Supplier Part Number 1: SW1020DKR-ND
footprint B3U-1000P (SWITCH TACTILE SPST-NO 0.05A 12V)
pins: 1, 2

## B3U-3000P
designator SW?
SWITCH TACTILE SPST-NO 0.05A 12V; Manufacturer: Omron; Mechanical Life: 100000Cycles; Operating Force: 1.59N; Contact Resistance: 100mR; Throw Configuration: SPST; Current Rating: 50mA; Illumination Type: Non-Illuminated,Illuminated; Switch Travel: 0.2mm; Switch Function: Off-Mom; Actuator Length: 0.7mm; Ratings: Dust Proof,IP40; Supplier 1: Digi-Key; Manufacturer Part Number: B3U-3000P; RoHS: Yes; Category: Tactile Switches; Stock 1: 1862; Pricing 1: 1=0.97000, 10=0.93600, 25=0.87480, 100=0.75970, 250=0.69132, 500=0.64092, 1000=0.59411 (USD); Mount: Surface Mount; Weight: 0.022g; Contact Material: Silver; Min Operating Temperature: -25°C; Max Operating Temperature: 70°C; Packaging: Tape and Reel; Voltage Rating (DC): 12V; Package Quantity: 1; Max Voltage Rating (DC): 12V; Termination: SMD/SMT; Electrical Life: 100000Cycles; Orientation: Right Angle; Max Current Rating: 50mA; Contact Current Rating: 50mA; Insulation Resistance: 100MR; Length: 4mm; Depth: 3.2mm; REACH SVHC: Unknown; Lead Free: Lead Free; ComponentLink1URL: https://datasheet.ciiva.com/1634/60838-1634400.pdf?src-supplier=Farnell; ComponentLink1Description: https://datasheet.ciiva.com/1634/60838-1634400.pdf?src-supplier=Farnell; ComponentLink2URL: https://datasheet.ciiva.com/2900/b3u-1110-2900035.pdf?src-supplier=Digi-Key; ComponentLink2Description: https://datasheet.ciiva.com/2900/b3u-1110-2900035.pdf?src-supplier=Digi-Key; ComponentLink3URL: https://datasheet.ciiva.com/2900/b3u-1110-2900036.pdf?src-supplier=Digi-Key; ComponentLink3Description: https://datasheet.ciiva.com/2900/b3u-1110-2900036.pdf?src-supplier=Digi-Key; ComponentLink4URL: https://datasheet.ciiva.com/2900/b3u-1110-2900037.pdf?src-supplier=Digi-Key; ComponentLink4Description: https://datasheet.ciiva.com/2900/b3u-1110-2900037.pdf?src-supplier=Digi-Key; ComponentLink5URL: https://datasheet.ciiva.com/1532/60838-1532682.pdf?src-supplier=Element14; ComponentLink5Description: https://datasheet.ciiva.com/1532/60838-1532682.pdf?src-supplier=Element14; ComponentLink6URL: https://datasheet.ciiva.com/16863/70176037-16863994.pdf?src-supplier=Allied+Electronics; ComponentLink6Description: https://datasheet.ciiva.com/16863/70176037-16863994.pdf?src-supplier=Allied+Electronics; ComponentLink7URL: https://datasheet.ciiva.com/14142/b3u-eng-datasheet-14142542.pdf?src-supplier=Distrelec; ComponentLink7Description: https://datasheet.ciiva.com/14142/b3u-eng-datasheet-14142542.pdf?src-supplier=Distrelec; ComponentLink8URL: https://datasheet.ciiva.com/30158/en-b3u-30158606.pdf?src-supplier=Onlinecomponents.com; ComponentLink8Description: https://datasheet.ciiva.com/30158/en-b3u-30158606.pdf?src-supplier=Onlinecomponents.com; Supplier Part Number 1: SW1022CT-ND
footprint B3U-3000P
pins: 1, 2

## BQ24092DGQR
designator U?
IC BATT CHG LI-ION 1CELL 10MSOP; Manufacturer: Texas Instruments; Output Current: 1A; Min Supply Voltage: 3.5V; Max Supply Voltage: 6.45V; Output Voltage: 4.2V; Min Input Voltage: 4.5V; Number of Cells: 1; Interface: USB; Fault Protection: Over Voltage,Over Temperature,Short Circuit; Supplier 1: Digi-Key; Manufacturer Part Number: BQ24092DGQR; RoHS: Yes; Category: Battery Management; Stock 1: 52631; Pricing 1: 1=1.29000, 10=1.15100, 25=1.09200, 100=0.83850, 250=0.74100, 500=0.70200, 1000=0.54600 (USD); Case/Package: HTSSOP EP; Number of Pins: 10; Contact Plating: Gold; Min Operating Temperature: -40°C; Max Operating Temperature: 125°C; Packaging: Tape and Reel; Package Quantity: 2500; Max Charge Current: 1A; Battery Pack Voltage: 4.2V; Radiation Hardening: No; Lead Free: Lead Free; ComponentLink1URL: https://datasheet.ciiva.com/15114/getdatasheetpartid-516671-15114858.pdf?src-supplier=Verical; ComponentLink1Description: https://datasheet.ciiva.com/15114/getdatasheetpartid-516671-15114858.pdf?src-supplier=Verical; ComponentLink2URL: https://datasheet.ciiva.com/1934/bq24092-1934314.pdf?src-supplier=Digi-Key; ComponentLink2Description: https://datasheet.ciiva.com/1934/bq24092-1934314.pdf?src-supplier=Digi-Key; ComponentLink3URL: https://datasheet.ciiva.com/3214/bq24092-3214092.pdf?src-supplier=Avnet; ComponentLink3Description: https://datasheet.ciiva.com/3214/bq24092-3214092.pdf?src-supplier=Avnet; Supplier Part Number 1: 296-41204-1-ND
footprint BQ24092DGQR (IC BATT CHG LI-ION 1CELL 10MSOP)
pins: 1 IN, 2 ISET, 3 VSS, 4 PRETERM, 5 PG, 6 NC, 7 ISET2, 8 CHG, 9 TS, 10 OUT, 11 GND

## BQ25303JRTER
designator U?
STANDALONE 1-CELL 17-V, 3.0-A BA; Manufacturer: Texas Instruments; Supplier 1: Digi-Key; Manufacturer Part Number: BQ25303JRTER; RoHS: Yes; Stock 1: 2495; Pricing 1: 1=2.19000, 10=1.96600, 25=1.85520, 100=1.58050, 250=1.48400, 500=1.29850, 1000=1.16900 (USD); Supplier Part Number 1: 296-BQ25303JRTERCT-ND
footprint 16-WQFN (3x3) (Charger IC Lithium Ion/Polymer 16-WQFN (3x3))
pins: 1 VBUS, 2 REGN, 3 STAT, 4 ICHG, 5 POL, 6 EN, 7 TS, 8 NC, 9 VSET, 10 BAT, 11 GND, 12 GND, 13 SW, 14 SW, 15 BTST, 16 PMID , 17 GND

## BSS138LT1G
designator Q?  (value not drawn)
MOSFET N-CH 50V 200MA SOT-23; Manufacturer: ON Semiconductor; Gate to Source Voltage (Vgs): 20V; Nominal Vgs: 1.5V; Rds On Max: 3.5R; Input Capacitance: 50pF; Number of Elements: 1; Max Power Dissipation: 225mW; Turn-Off Delay Time: 20ns; Element Configuration: Single; ComponentLink1URL: https://datasheet.ciiva.com/22641/1596366-22641636.pdf; ComponentLink1Description: https://datasheet.ciiva.com/22641/1596366-22641636.pdf; ComponentLink2URL: https://datasheet.ciiva.com/1190/1596366-1190137.pdf; ComponentLink2Description: https://datasheet.ciiva.com/1190/1596366-1190137.pdf; ComponentLink3URL: https://datasheet.ciiva.com/15198/getdatasheetpartid-110266-15198908.pdf; ComponentLink3Description: https://datasheet.ciiva.com/15198/getdatasheetpartid-110266-15198908.pdf; ComponentLink4URL: https://datasheet.ciiva.com/8115/bss138lt1-d-8115295.pdf; ComponentLink4Description: https://datasheet.ciiva.com/8115/bss138lt1-d-8115295.pdf; ComponentLink5URL: https://datasheet.ciiva.com/8115/bss138lt1-d-8115358.pdf; ComponentLink5Description: https://datasheet.ciiva.com/8115/bss138lt1-d-8115358.pdf; ComponentLink6URL: https://datasheet.ciiva.com/1190/1596366-1190136.pdf; ComponentLink6Description: https://datasheet.ciiva.com/1190/1596366-1190136.pdf; ComponentLink7URL: https://datasheet.ciiva.com/936/bss138lt1-d-936802.pdf; ComponentLink7Description: https://datasheet.ciiva.com/936/bss138lt1-d-936802.pdf; ComponentLink8URL: https://datasheet.ciiva.com/936/bss138lt1-d-936801.pdf; ComponentLink8Description: https://datasheet.ciiva.com/936/bss138lt1-d-936801.pdf; ComponentLink9URL: https://datasheet.ciiva.com/14553/70099493-14553829.pdf; ComponentLink9Description: https://datasheet.ciiva.com/14553/70099493-14553829.pdf; ComponentLink10URL: https://datasheet.ciiva.com/936/bss138lt1-d-936803.pdf; ComponentLink10Description: https://datasheet.ciiva.com/936/bss138lt1-d-936803.pdf; Supplier 1: Digi-Key; Manufacturer Part Number: BSS138LT1G; Stock 1: 1283212; Pricing 1: 1=0.27, 10=0.222, 100=0.1177, 500=0.07746, 1000=0.05267 (USD); Case/Package: SOT-23-3; Number of Pins: 3; Contact Plating: Tin,Matte; Min Operating Temperature: -55°C; Max Operating Temperature: 150°C; Continuous Drain Current (ID): 200mA; Package Quantity: 1; Packaging: Tape and Reel; Drain to Source Breakdown Voltage: 50V; Power Dissipation: 225mW; Drain to Source Resistance: 3.5R; Threshold Voltage: 1.5V; Turn-On Delay Time: 20ns; Voltage Rating (DC): 50V; Current Rating: 200mA; On-State Resistance: 3.5R; Length: 3.04mm; Height: 1.01mm; Width: 1.4mm; Radiation Hardening: No; REACH SVHC: No SVHC; Lead Free: Lead Free; Halogen Free: Halogen Free; ComponentLink11URL: http://www.onsemi.com/pub/Collateral/BSS138LT1-D.PDF?src-supplier=Digi-Key; ComponentLink11Description: http://www.onsemi.com/pub/Collateral/BSS138LT1-D.PDF?src-supplier=Digi-Key; ComponentLink12URL: http://www.farnell.com/datasheets/1596366.pdf?src-supplier=Element14; ComponentLink12Description: http://www.farnell.com/datasheets/1596366.pdf?src-supplier=Element14; ComponentLink13URL: http://www.alliedelec.com/m/d/b3c6fd7d92596813fe75d33dcbaaae90.pdf?src-supplier=Allied+Electronics; ComponentLink13Description: http://www.alliedelec.com/m/d/b3c6fd7d92596813fe75d33dcbaaae90.pdf?src-supplier=Allied+Electronics; ComponentLink14URL: https://www.verical.com/server-webapp/html/getDatasheet?partID=110266&src-supplier=Verical; ComponentLink14Description: https://www.verical.com/server-webapp/html/getDatasheet?partID=110266&src-supplier=Verical; ComponentLink15URL: http://www.onsemi.com/pub_link/Collateral/BSS138LT1-D.PDF?src-supplier=Avnet; ComponentLink15Description: http://www.onsemi.com/pub_link/Collateral/BSS138LT1-D.PDF?src-supplier=Avnet; Supplier Part Number 1: BSS138LT1GOSDKR-ND
footprint SOT-23 (TRANS NPN 40V 0.6A SOT23)
pins: 1 G, 2 S, 3 D

## C0603C180J5GACTU
designator C?, comment 18pF
CAP CER 18PF 50V C0G/NP0 0603; Manufacturer: KEMET; Manufacturer Part Number: C0603C180J5GACTU; Dielectric Material: Ceramic; Tolerance: 5%; Dielectric: C0G; Dissipation Factor: 0.1%; Temperature Coefficient: 30ppm/°C; Supplier 1: Digi-Key; Stock 1: 196781; Pricing 1: 1=0.1, 10=0.049, 100=0.0217, 500=0.01552, 1000=0.01219 (USD); Mount: Surface Mount; Case/Package: 0603; Case Code (Imperial): 0603; Case Code (Metric): 1608; Min Operating Temperature: -55°C; Max Operating Temperature: 125°C; Packaging: Tape and Reel; Capacitance: 18pF; Package Quantity: 4000; Voltage Rating: 50V; Voltage Rating (DC): 50V; Termination: SMD/SMT; Voltage: 50V; Length: 1.6mm; Height: 0.8mm; Width: 0.8mm; Depth: 0.8mm; Radiation Hardening: No; Lead Free: Lead Free; ComponentLink1URL: http://www.kemet.com/kemet/web/homepage/kechome.nsf/file/F9080B_0402_Series_C0G/$file/F9080B_0402_Series_C0G.pdf?src-supplier=Element14; ComponentLink1Description: http://www.kemet.com/kemet/web/homepage/kechome.nsf/file/F9080B_0402_Series_C0G/$file/F9080B_0402_Series_C0G.pdf?src-supplier=Element14; ComponentLink2URL: http://www.farnell.com/datasheets/1372242.pdf?src-supplier=Element14; ComponentLink2Description: http://www.farnell.com/datasheets/1372242.pdf?src-supplier=Element14; Supplier Part Number 1: 399-1052-1-ND
footprint Cap0603
pins: 1, 2

## C1608X5R1E106M080AC
designator C?, comment 10uF
CAP CER 10UF 25V X5R 0603; Manufacturer: TDK; Manufacturer Part Number: C1608X5R1E106M080AC; Dielectric Material: Ceramic; Tolerance: 20%; Supplier 1: Digi-Key; RoHS: Yes; Category: Ceramic Capacitors; Stock 1: 217631; Pricing 1: 1=0.86000, 10=0.60700, 50=0.45920, 100=0.39990, 500=0.29624, 1000=0.25180 (USD); Mount: Surface Mount; Case/Package: 0603; Case Code (Imperial): 0603; Case Code (Metric): 1608; Weight: 7.1E-05oz; Min Operating Temperature: -55°C; Max Operating Temperature: 85°C; Capacitance: 10uF; Packaging: Tape and Reel; Voltage Rating: 25V; Voltage Rating (DC): 25V; Termination: SMD/SMT; Series: C; Package Quantity: 1; Dielectric: X5R; Resistor Type: Ceramic; Construction: Flat; Length: 1.6mm; Width: 0.8mm; Height: 0.8mm; Thickness: 0.039inch; Depth: 0.8mm; Lead Free: Lead Free; REACH SVHC: No SVHC; RoHS Compliant: Yes; ComponentLink1URL: http://components.arrow.com/part/dataview/0323_06887183?src-supplier=Arrow+Europe; ComponentLink1Description: http://components.arrow.com/part/dataview/0323_06887183?src-supplier=Arrow+Europe; ComponentLink2URL: http://www.farnell.com/datasheets/2792994.pdf?src-supplier=Farnell; ComponentLink2Description: http://www.farnell.com/datasheets/2792994.pdf?src-supplier=Farnell; ComponentLink3URL: http://www.farnell.com/datasheets/2291921.pdf?src-supplier=Avnet; ComponentLink3Description: http://www.farnell.com/datasheets/2291921.pdf?src-supplier=Avnet; ComponentLink4URL: http://www.farnell.com/datasheets/1470445.pdf?src-supplier=Newark; ComponentLink4Description: http://www.farnell.com/datasheets/1470445.pdf?src-supplier=Newark; ComponentLink5URL: http://www.farnell.com/datasheets/2291921.pdf?src-supplier=Newark; ComponentLink5Description: http://www.farnell.com/datasheets/2291921.pdf?src-supplier=Newark; ComponentLink6URL: http://www.farnell.com/datasheets/2792994.pdf?src-supplier=Element14; ComponentLink6Description: http://www.farnell.com/datasheets/2792994.pdf?src-supplier=Element14; ComponentLink7URL: http://www.farnell.com/datasheets/1913358.pdf?src-supplier=Element14; ComponentLink7Description: http://www.farnell.com/datasheets/1913358.pdf?src-supplier=Element14; ComponentLink8URL: https://product.tdk.com/info/en/catalog/datasheets/mlcc_commercial_general_en.pdf?src-supplier=Digi-Key; ComponentLink8Description: https://product.tdk.com/info/en/catalog/datasheets/mlcc_commercial_general_en.pdf?src-supplier=Digi-Key; ComponentLink9URL: http://www.farnell.com/datasheets/2291921.pdf?src-supplier=RSComponents; ComponentLink9Description: http://www.farnell.com/datasheets/2291921.pdf?src-supplier=RSComponents; ComponentLink10URL: http://www.farnell.com/datasheets/2291921.pdf?src-supplier=Verical; ComponentLink10Description: http://www.farnell.com/datasheets/2291921.pdf?src-supplier=Verical; ComponentLink11URL: http://www.farnell.com/datasheets/2291921.pdf?src-supplier=Mouser; ComponentLink11Description: http://www.farnell.com/datasheets/2291921.pdf?src-supplier=Mouser; ComponentLink12URL: http://www.farnell.com/datasheets/2792994.pdf?src-supplier=Newark; ComponentLink12Description: http://www.farnell.com/datasheets/2792994.pdf?src-supplier=Newark; ComponentLink13URL: http://www.farnell.com/datasheets/2291921.pdf?src-supplier=Quest; ComponentLink13Description: http://www.farnell.com/datasheets/2291921.pdf?src-supplier=Quest; ComponentLink14URL: http://www.farnell.com/datasheets/2291921.pdf?src-supplier=TTI; ComponentLink14Description: http://www.farnell.com/datasheets/2291921.pdf?src-supplier=TTI; Supplier Part Number 1: 445-9015-1-ND
footprint Cap0603
pins: 1, 2

## CC0402KRX7R8BB103
designator C?, comment 10nF
CAP CER 10000PF 25V X7R 0402; Manufacturer: Yageo; Manufacturer Part Number: CC0402KRX7R8BB103; Tolerance: 10%; Supplier 1: Digi-Key; Stock 1: 0; Pricing 1: 1=0.1, 10=0.021, 100=0.0093, 500=0.00666, 1000=0.00523, 2500=0.00476, 5000=0.00438 (USD); Mount: Surface Mount; Case/Package: 0402; Case Code (Metric): 1005; Case Code (Imperial): 0402; Min Operating Temperature: -55°C; Max Operating Temperature: 125°C; Capacitance: 10nF; Dielectric: X7R; Voltage Rating: 25V; Package Quantity: 1; Packaging: Tape and Reel; Voltage Rating (DC): 25V; Termination: SMD/SMT; Composition: Ceramic; Length: 1mm; Height: 0.5mm; Depth: 0.5mm; Width: 0.02inch; Thickness: 0.022inch; Radiation Hardening: No; REACH SVHC: Unknown; Lead Free: Lead Free; Halogen Free: Halogen Free; ComponentLink1URL: http://www.yageo.com/documents/recent/UPY-GPHC_X7R_6.3V-to-50V_18.pdf?src-supplier=Digi-Key; ComponentLink1Description: http://www.yageo.com/documents/recent/UPY-GPHC_X7R_6.3V-to-50V_18.pdf?src-supplier=Digi-Key; ComponentLink2URL: https://www.verical.com/server-webapp/html/getDatasheet?partID=375418&src-supplier=Verical; ComponentLink2Description: https://www.verical.com/server-webapp/html/getDatasheet?partID=375418&src-supplier=Verical; ComponentLink3URL: http://www.yageo.com/documents/recent/UPY-GPHC_X7R_6.3V-to-50V_8.pdf?src-supplier=Avnet; ComponentLink3Description: http://www.yageo.com/documents/recent/UPY-GPHC_X7R_6.3V-to-50V_8.pdf?src-supplier=Avnet; ComponentLink4URL: https://4donline.ihs.com/images/VipMasterIC/IC/YAGO/YAGO-S-A0003557223/YAGO-S-A0003557223-1.pdf?hkey=52A5661711E402568146F3353EA87419&src-supplier=Element14; ComponentLink4Description: https://4donline.ihs.com/images/VipMasterIC/IC/YAGO/YAGO-S-A0003557223/YAGO-S-A0003557223-1.pdf?hkey=52A5661711E402568146F3353EA87419&src-supplier=Element14; ComponentLink5URL: http://www.farnell.com/datasheets/2167236.pdf?src-supplier=Element14; ComponentLink5Description: http://www.farnell.com/datasheets/2167236.pdf?src-supplier=Element14; ComponentLink6URL: http://www.mouser.com/ds/2/447/Yageo_UPY-GP_NP0_16V-to-50V_9-358835.pdf?src-supplier=Mouser; ComponentLink6Description: http://www.mouser.com/ds/2/447/Yageo_UPY-GP_NP0_16V-to-50V_9-358835.pdf?src-supplier=Mouser; Supplier Part Number 1: 311-1337-1-ND
footprint Cap0402
pins: 1, 2